# Altium footprint library WR-PHD_Socket Header.PcbLib: 279 footprints (part 6 of 18)
Each footprint in its own frame and in the unit in brackets; x right, y up, seen from the top. Pads: shape width x height; smd on the part's side, far side on the other; paste and mask are expansions set on the pad; w line width, h text height; cw(c..) or ccw(c..) is an arc to the next point about the centre after c.
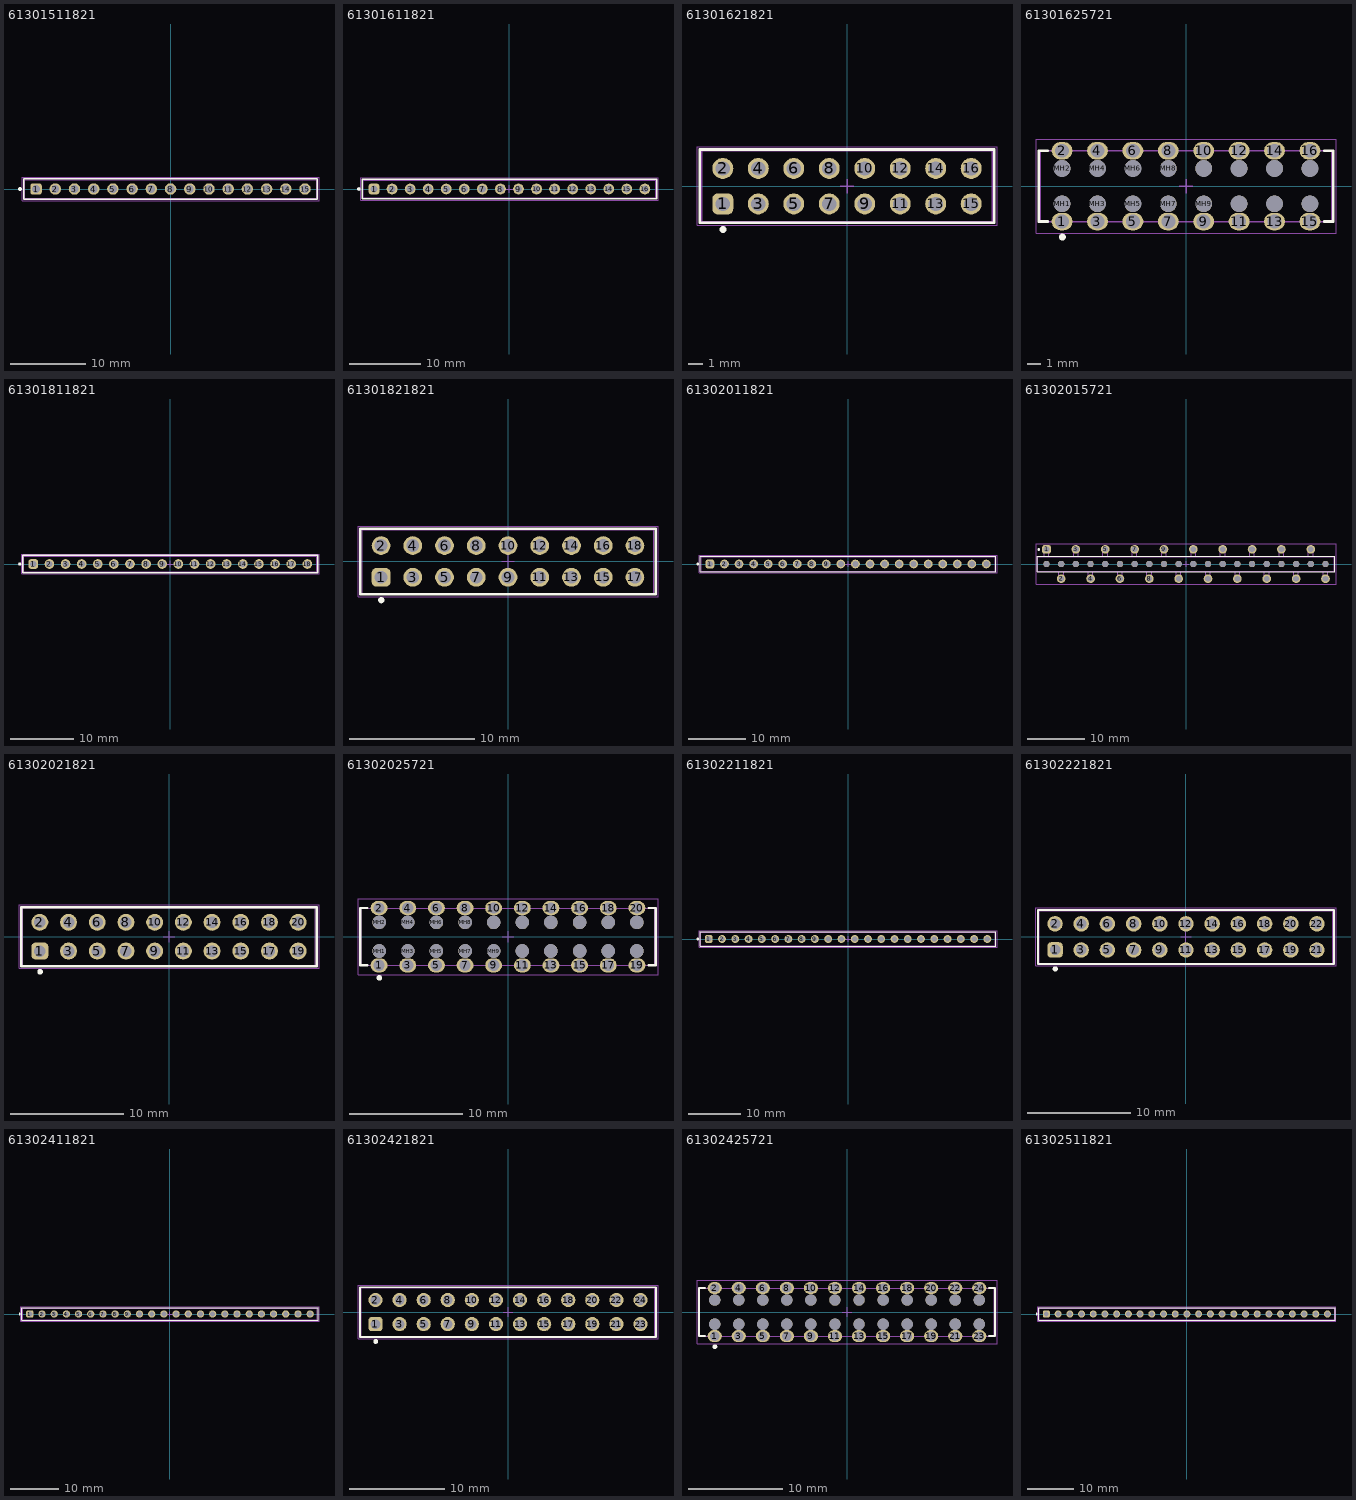
[diagram p5: the footprints below, top view; thin cyan lines are the x and y axes]

## 61301511821 [mm] "Socket Header, Pitch 2.54 mm, THT, Vertical, single row, 15p"
height 8.5
pads (15):
  rrect50% 1.52x1.52 hole 1.02: 1(-17.78,0)
  round 1.52 hole 1.02: 2(-15.24,0) 3(-12.7,0) 4(-10.16,0) 5(-7.62,0) 6(-5.08,0) 7(-2.54,0) 8(0,0) 9(2.54,0) 10(5.08,0) 11(7.62,0) 12(10.16,0) 13(12.7,0) 14(15.24,0) 15(17.78,0)
Top Overlay:
  circle w0.25: c-19.91,0 r0.125
  lines w0.2: -19.425,-1.35 19.425,-1.35 19.425,1.35 -19.425,1.35 -19.425,-1.35
Top Component Outline:
  lines w0.1: -19.3,-1.25 19.3,-1.25 19.3,1.25 -19.3,1.25 -19.3,-1.25
Top Designator:
  text ".Designator" at -3.647,-0.357 h1
Top Courtyard:
  lines w0.05: -19.625,-1.55 19.625,-1.55 19.625,1.55 -19.625,1.55 -19.625,-1.55
Top Component Center:
  lines w0.1: -0.5,0 0.5,0 ; 0,-0.5 0,0.5
3D body "61301511821.stp": height 8.55, standoff -3.06, extent -19.3,-1.25 19.3,1.25

## 61301611821 [mm] "Socket Header, Pitch 2.54 mm, THT, Vertical, single row, 16p"
height 8.5
pads (16):
  rrect50% 1.52x1.52 hole 1.02: 1(-19.05,0)
  round 1.52 hole 1.02: 2(-16.51,0) 3(-13.97,0) 4(-11.43,0) 5(-8.89,0) 6(-6.35,0) 7(-3.81,0) 8(-1.27,0) 9(1.27,0) 10(3.81,0) 11(6.35,0) 12(8.89,0) 13(11.43,0) 14(13.97,0) 15(16.51,0) 16(19.05,0)
Top Overlay:
  circle w0.25: c-21.18,0 r0.125
  lines w0.2: -20.695,-1.35 20.695,-1.35 20.695,1.35 -20.695,1.35 -20.695,-1.35
Top Component Outline:
  lines w0.1: -20.57,-1.25 20.57,-1.25 20.57,1.25 -20.57,1.25 -20.57,-1.25
Top Designator:
  text ".Designator" at -3.647,-0.357 h1
Top Courtyard:
  lines w0.05: -20.895,-1.55 20.895,-1.55 20.895,1.55 -20.895,1.55 -20.895,-1.55
Top Component Center:
  lines w0.1: -0.5,0 0.5,0 ; 0,-0.5 0,0.5
3D body "61301611821.stp": height 8.55, standoff -3.06, extent -20.57,-1.25 20.57,1.25

## 61301621821 [mm] "Socket Header, Pitch 2.54 mm, THT, Vertical, dual row, 16p"
height 8.4
pads (16):
  rrect50% 1.5x1.5 hole 1.02: 1(-8.89,-1.27)
  round 1.5 hole 1.02: 2(-8.89,1.27) 3(-6.35,-1.27) 4(-6.35,1.27) 5(-3.81,-1.27) 6(-3.81,1.27) 7(-1.27,-1.27) 8(-1.27,1.27) 9(1.27,-1.27) 10(1.27,1.27) 11(3.81,-1.27) 12(3.81,1.27) 13(6.35,-1.27) 14(6.35,1.27) 15(8.89,-1.27) 16(8.89,1.27)
Top Overlay:
  circle w0.25: c-8.87,-3.1 r0.125
  lines w0.2: -10.535,-2.615 -10.535,2.615 10.535,2.615 10.535,-2.615 -10.535,-2.615
Top Component Outline:
  lines w0.1: -10.41,-2.54 10.41,-2.54 10.41,2.54 -10.41,2.54 -10.41,-2.54
Top Designator:
  text ".Designator" at -3.647,-0.357 h1
Top Courtyard:
  lines w0.05: -10.735,-2.815 10.735,-2.815 10.735,2.815 -10.735,2.815 -10.735,-2.815
Top Component Center:
  lines w0.1: -0.5,0 0.5,0 ; 0,-0.5 0,0.5
3D body "61301621821.stp": height 8.45, standoff -3.05, extent -10.41,-2.54 10.41,2.54

## 61301625721 [mm] "Dual Socket Header Bottom Entry, pitch 2.54mm, 16p"
height 5
pads (32):
  oval 1.5x1.25 hole 1: 1(-8.89,-2.54) 2(-8.89,2.54) 3(-6.35,-2.54) 4(-6.35,2.54) 5(-3.81,-2.54) 6(-3.81,2.54) 7(-1.27,-2.54) 8(-1.27,2.54) 9(1.27,-2.54) 10(1.27,2.54) 11(3.81,-2.54) 12(3.81,2.54) 13(6.35,-2.54) 14(6.35,2.54) 15(8.89,-2.54) 16(8.89,2.54)
  round 1.2 hole 1.2 unplated: MH1(-8.89,-1.27) MH2(-8.89,1.27) MH3(-6.35,-1.27) MH4(-6.35,1.27) MH5(-3.81,-1.27) MH6(-3.81,1.27) MH7(-1.27,-1.27) MH8(-1.27,1.27) MH9(1.27,-1.27) MH10(1.27,1.27) MH11(3.81,-1.27) MH12(3.81,1.27) MH13(6.35,-1.27) MH14(6.35,1.27) MH15(8.89,-1.27) MH16(8.89,1.27)
Top Overlay:
  circle w0.25: c-8.87,-3.65 r0.125
  lines w0.2: -9.92,-2.54 -10.56,-2.54 -10.56,2.54 -9.92,2.54 ; 9.92,-2.54 10.56,-2.54 10.56,2.54 9.92,2.54
Top Component Outline:
  lines w0.1: -10.46,-2.54 -10.46,2.54 10.46,2.54 10.46,-2.54 -10.46,-2.54
Top Designator:
  text ".Designator" at -3.647,-0.357 h1
Top Courtyard:
  lines w0.05: -10.76,-3.365 10.76,-3.365 10.76,3.365 -10.76,3.365 -10.76,-3.365
Top Component Center:
  lines w0.1: -0.5,0 0.5,0 ; 0,-0.5 0,0.5
3D body "61301625721.stp": height 5.05, standoff -3.05, extent -10.46,-2.665 10.46,2.665

## 61301811821 [mm] "Socket Header, Pitch 2.54 mm, THT, Vertical, single row, 18p"
height 8.5
pads (18):
  rrect50% 1.52x1.52 hole 1.02: 1(-21.59,0)
  round 1.52 hole 1.02: 2(-19.05,0) 3(-16.51,0) 4(-13.97,0) 5(-11.43,0) 6(-8.89,0) 7(-6.35,0) 8(-3.81,0) 9(-1.27,0) 10(1.27,0) 11(3.81,0) 12(6.35,0) 13(8.89,0) 14(11.43,0) 15(13.97,0) 16(16.51,0) 17(19.05,0) 18(21.59,0)
Top Overlay:
  circle w0.25: c-23.72,0 r0.125
  lines w0.2: -23.235,-1.35 -23.235,1.35 23.235,1.35 23.235,-1.35 -23.235,-1.35
Top Component Outline:
  lines w0.1: -23.11,-1.25 -23.11,1.25 23.11,1.25 23.11,-1.25 -23.11,-1.25
Top Designator:
  text ".Designator" at -3.647,-0.357 h1
Top Courtyard:
  lines w0.05: -23.435,-1.55 -23.435,1.55 23.435,1.55 23.435,-1.55 -23.435,-1.55
Top Component Center:
  lines w0.1: -0.5,0 0.5,0 ; 0,-0.5 0,0.5
3D body "61301811821.stp": height 8.55, standoff -3.06, extent -23.11,-1.25 23.11,1.25

## 61301821821 [mm] "Socket Header, Pitch 2.54 mm, THT, Vertical, dual row, 18p"
height 8.4
pads (18):
  rrect50% 1.5x1.5 hole 1.02: 1(-10.16,-1.27)
  round 1.5 hole 1.02: 2(-10.16,1.27) 3(-7.62,-1.27) 4(-7.62,1.27) 5(-5.08,-1.27) 6(-5.08,1.27) 7(-2.54,-1.27) 8(-2.54,1.27) 9(0,-1.27) 10(0,1.27) 11(2.54,-1.27) 12(2.54,1.27) 13(5.08,-1.27) 14(5.08,1.27) 15(7.62,-1.27) 16(7.62,1.27) 17(10.16,-1.27) 18(10.16,1.27)
Top Overlay:
  circle w0.25: c-10.14,-3.1 r0.125
  lines w0.2: -11.805,-2.615 11.805,-2.615 11.805,2.615 -11.805,2.615 -11.805,-2.615
Top Component Outline:
  lines w0.1: -11.68,-2.54 -11.68,2.54 11.68,2.54 11.68,-2.54 -11.68,-2.54
Top Designator:
  text ".Designator" at -3.647,-0.357 h1
Top Courtyard:
  lines w0.05: -12.005,-2.815 -12.005,2.815 12.005,2.815 12.005,-2.815 -12.005,-2.815
Top Component Center:
  lines w0.1: -0.5,0 0.5,0 ; 0,-0.5 0,0.5
3D body "61301821821.stp": height 8.45, standoff -3.05, extent -11.68,-2.54 11.68,2.54

## 61302011821 [mm] "Socket Header, Pitch 2.54 mm, THT, Vertical, single row, 20p"
height 8.5
pads (20):
  rrect50% 1.52x1.52 hole 1.02: 1(-24.13,0)
  round 1.52 hole 1.02: 2(-21.59,0) 3(-19.05,0) 4(-16.51,0) 5(-13.97,0) 6(-11.43,0) 7(-8.89,0) 8(-6.35,0) 9(-3.81,0) 10(-1.27,0) 11(1.27,0) 12(3.81,0) 13(6.35,0) 14(8.89,0) 15(11.43,0) 16(13.97,0) 17(16.51,0) 18(19.05,0) 19(21.59,0) 20(24.13,0)
Top Overlay:
  circle w0.25: c-26.26,0 r0.125
  lines w0.2: -25.775,-1.35 25.775,-1.35 25.775,1.35 -25.775,1.35 -25.775,-1.35
Top Component Outline:
  lines w0.1: -25.65,-1.25 25.65,-1.25 25.65,1.25 -25.65,1.25 -25.65,-1.25
Top Designator:
  text ".Designator" at -3.647,-0.357 h1
Top Courtyard:
  lines w0.05: -25.975,-1.55 25.975,-1.55 25.975,1.55 -25.975,1.55 -25.975,-1.55
Top Component Center:
  lines w0.1: -0.5,0 0.5,0 ; 0,-0.5 0,0.5
3D body "61302011821.stp": height 8.55, standoff -3.06, extent -25.65,-1.25 25.65,1.25

## 61302015721 [mm] "Socket Header, Pitch 2.54 mm, THT, Vertical, single row, 20p"
height 5
pads (40):
  rrect50% 1.5x1.5 hole 1: 1(-24.13,2.54)
  round 1.5 hole 1: 2(-21.59,-2.54) 3(-19.05,2.54) 4(-16.51,-2.54) 5(-13.97,2.54) 6(-11.43,-2.54) 7(-8.89,2.54) 8(-6.35,-2.54) 9(-3.81,2.54) 10(-1.27,-2.54) 11(1.27,2.54) 12(3.81,-2.54) 13(6.35,2.54) 14(8.89,-2.54) 15(11.43,2.54) 16(13.97,-2.54) 17(16.51,2.54) 18(19.05,-2.54) 19(21.59,2.54) 20(24.13,-2.54)
  round 1.1 hole 1.1 unplated: MH1(-24.13,0) MH2(-21.59,0) MH3(-19.05,0) MH4(-16.51,0) MH5(-13.97,0) MH6(-11.43,0) MH7(-8.89,0) MH8(-6.35,0) MH9(-3.81,0) MH10(-1.27,0) MH11(1.27,0) MH12(3.81,0) MH13(6.35,0) MH14(8.89,0) MH15(11.43,0) MH16(13.97,0) MH17(16.51,0) MH18(19.05,0) MH19(21.59,0) MH20(24.13,0)
Top Overlay:
  circle w0.25: c-25.47,2.5 r0.125
  lines w0.2: -25.75,-1.345 25.75,-1.345 25.75,1.345 -25.75,1.345 -25.75,-1.345
Top Component Outline:
  lines w0.1: -24.53,1.27 -24.53,2.665 -23.73,2.665 -23.73,1.27 ; -21.99,-1.27 -21.99,-2.665 -21.19,-2.665 -21.19,-1.27 ; -19.45,1.27 -19.45,2.665 -18.65,2.665 -18.65,1.27 ; -16.91,-1.27 -16.91,-2.665 -16.11,-2.665 -16.11,-1.27 ; -14.37,1.27 -14.37,2.665 -13.57,2.665 -13.57,1.27 ; -11.83,-1.27 -11.83,-2.665 -11.03,-2.665 -11.03,-1.27 ; -9.29,1.27 -9.29,2.665 -8.49,2.665 -8.49,1.27 ; -6.75,-1.27 -6.75,-2.665 -5.95,-2.665 -5.95,-1.27 ; -4.21,1.27 -4.21,2.665 -3.41,2.665 -3.41,1.27 ; -1.67,-1.27 -1.67,-2.665 -0.87,-2.665 -0.87,-1.27 ; 0.87,1.27 0.87,2.665 1.67,2.665 1.67,1.27 ; 3.41,-1.27 3.41,-2.665 4.21,-2.665 4.21,-1.27 ; 5.95,1.27 5.95,2.665 6.75,2.665 6.75,1.27 ; 8.49,-1.27 8.49,-2.665 9.29,-2.665 9.29,-1.27 ; 11.03,1.27 11.03,2.665 11.83,2.665 11.83,1.27 ; 13.57,-1.27 13.57,-2.665 14.37,-2.665 14.37,-1.27 ; 16.11,1.27 16.11,2.665 16.91,2.665 16.91,1.27 ; 18.65,-1.27 18.65,-2.665 19.45,-2.665 19.45,-1.27 ; 21.19,1.27 21.19,2.665 21.99,2.665 21.99,1.27 ; 23.73,-1.27 23.73,-2.665 24.53,-2.665 24.53,-1.27 ; -25.65,-1.27 25.65,-1.27 25.65,1.27 -25.65,1.27 -25.65,-1.27
Top Designator:
  text ".Designator" at -3.647,-0.357 h1
Top Courtyard:
  lines w0.05: -25.95,-3.49 -25.95,3.49 25.95,3.49 25.95,-3.49 -25.95,-3.49
Top Component Center:
  lines w0.1: -0.5,0 0.5,0 ; 0,-0.5 0,0.5
3D body "61302015721.stp": height 5.17, standoff -2.93, extent -25.7,-2.665 25.7,2.665

## 61302021821 [mm] "Socket Header, Pitch 2.54 mm, THT, Vertical, dual row, 20p"
height 8.4
pads (20):
  rrect50% 1.5x1.5 hole 1.02: 1(-11.43,-1.27)
  round 1.5 hole 1.02: 2(-11.43,1.27) 3(-8.89,-1.27) 4(-8.89,1.27) 5(-6.35,-1.27) 6(-6.35,1.27) 7(-3.81,-1.27) 8(-3.81,1.27) 9(-1.27,-1.27) 10(-1.27,1.27) 11(1.27,-1.27) 12(1.27,1.27) 13(3.81,-1.27) 14(3.81,1.27) 15(6.35,-1.27) 16(6.35,1.27) 17(8.89,-1.27) 18(8.89,1.27) 19(11.43,-1.27) 20(11.43,1.27)
Top Overlay:
  circle w0.25: c-11.41,-3.1 r0.125
  lines w0.2: -13.075,-2.615 -13.075,2.615 13.075,2.615 13.075,-2.615 -13.075,-2.615
Top Component Outline:
  lines w0.1: -12.95,-2.54 12.95,-2.54 12.95,2.54 -12.95,2.54 -12.95,-2.54
Top Designator:
  text ".Designator" at -3.647,-0.357 h1
Top Courtyard:
  lines w0.05: -13.275,-2.815 13.275,-2.815 13.275,2.815 -13.275,2.815 -13.275,-2.815
Top Component Center:
  lines w0.1: -0.5,0 0.5,0 ; 0,-0.5 0,0.5
3D body "61302021821.stp": height 8.45, standoff -3.05, extent -12.95,-2.54 12.95,2.54

## 61302025721 [mm] "Dual Socket Header Bottom Entry, pitch 2.54mm, 20p"
height 5
pads (40):
  oval 1.5x1.25 hole 1: 1(-11.43,-2.54) 2(-11.43,2.54) 3(-8.89,-2.54) 4(-8.89,2.54) 5(-6.35,-2.54) 6(-6.35,2.54) 7(-3.81,-2.54) 8(-3.81,2.54) 9(-1.27,-2.54) 10(-1.27,2.54) 11(1.27,-2.54) 12(1.27,2.54) 13(3.81,-2.54) 14(3.81,2.54) 15(6.35,-2.54) 16(6.35,2.54) 17(8.89,-2.54) 18(8.89,2.54) 19(11.43,-2.54) 20(11.43,2.54)
  round 1.2 hole 1.2 unplated: MH1(-11.43,-1.27) MH2(-11.43,1.27) MH3(-8.89,-1.27) MH4(-8.89,1.27) MH5(-6.35,-1.27) MH6(-6.35,1.27) MH7(-3.81,-1.27) MH8(-3.81,1.27) MH9(-1.27,-1.27) MH10(-1.27,1.27) MH11(1.27,-1.27) MH12(1.27,1.27) MH13(3.81,-1.27) MH14(3.81,1.27) MH15(6.35,-1.27) MH16(6.35,1.27) MH17(8.89,-1.27) MH18(8.89,1.27) MH19(11.43,-1.27) MH20(11.43,1.27)
Top Overlay:
  circle w0.25: c-11.41,-3.65 r0.125
  lines w0.2: -12.46,-2.54 -13.1,-2.54 -13.1,2.54 -12.46,2.54 ; 12.46,-2.54 13.1,-2.54 13.1,2.54 12.46,2.54
Top Component Outline:
  lines w0.1: -13,-2.54 -13,2.54 13,2.54 13,-2.54 -13,-2.54
Top Designator:
  text ".Designator" at -3.647,-0.357 h1
Top Courtyard:
  lines w0.05: -13.3,-3.365 13.3,-3.365 13.3,3.365 -13.3,3.365 -13.3,-3.365
Top Component Center:
  lines w0.1: -0.5,0 0.5,0 ; 0,-0.5 0,0.5
3D body "61302025721.stp": height 5.05, standoff -3.05, extent -13,-2.665 13,2.665

## 61302211821 [mm] "Socket Header, Pitch 2.54 mm, THT, Vertical, single row, 22p"
height 8.5
pads (22):
  rrect50% 1.52x1.52 hole 1.02: 1(-26.67,0)
  round 1.52 hole 1.02: 2(-24.13,0) 3(-21.59,0) 4(-19.05,0) 5(-16.51,0) 6(-13.97,0) 7(-11.43,0) 8(-8.89,0) 9(-6.35,0) 10(-3.81,0) 11(-1.27,0) 12(1.27,0) 13(3.81,0) 14(6.35,0) 15(8.89,0) 16(11.43,0) 17(13.97,0) 18(16.51,0) 19(19.05,0) 20(21.59,0) 21(24.13,0) 22(26.67,0)
Top Overlay:
  circle w0.25: c-28.8,0 r0.125
  lines w0.2: -28.315,-1.35 28.315,-1.35 28.315,1.35 -28.315,1.35 -28.315,-1.35
Top Component Outline:
  lines w0.1: -28.19,-1.25 28.19,-1.25 28.19,1.25 -28.19,1.25 -28.19,-1.25
Top Designator:
  text ".Designator" at -3.647,-0.357 h1
Top Courtyard:
  lines w0.05: -28.515,-1.55 28.515,-1.55 28.515,1.55 -28.515,1.55 -28.515,-1.55
Top Component Center:
  lines w0.1: -0.5,0 0.5,0 ; 0,-0.5 0,0.5
3D body "61302211821.stp": height 8.55, standoff -3.06, extent -28.19,-1.25 28.19,1.25

## 61302221821 [mm] "Socket Header, Pitch 2.54 mm, THT, Vertical, dual row, 22p"
height 8.4
pads (22):
  rrect50% 1.5x1.5 hole 1.02: 1(-12.7,-1.27)
  round 1.5 hole 1.02: 2(-12.7,1.27) 3(-10.16,-1.27) 4(-10.16,1.27) 5(-7.62,-1.27) 6(-7.62,1.27) 7(-5.08,-1.27) 8(-5.08,1.27) 9(-2.54,-1.27) 10(-2.54,1.27) 11(0,-1.27) 12(0,1.27) 13(2.54,-1.27) 14(2.54,1.27) 15(5.08,-1.27) 16(5.08,1.27) 17(7.62,-1.27) 18(7.62,1.27) 19(10.16,-1.27) 20(10.16,1.27) 21(12.7,-1.27) 22(12.7,1.27)
Top Overlay:
  circle w0.25: c-12.68,-3.1 r0.125
  lines w0.2: -14.345,-2.615 14.345,-2.615 14.345,2.615 -14.345,2.615 -14.345,-2.615
Top Component Outline:
  lines w0.1: -14.22,-2.54 -14.22,2.54 14.22,2.54 14.22,-2.54 -14.22,-2.54
Top Designator:
  text ".Designator" at -3.647,-0.357 h1
Top Courtyard:
  lines w0.05: -14.545,-2.815 -14.545,2.815 14.545,2.815 14.545,-2.815 -14.545,-2.815
Top Component Center:
  lines w0.1: -0.5,0 0.5,0 ; 0,-0.5 0,0.5
3D body "61302221821.stp": height 8.45, standoff -3.05, extent -14.22,-2.54 14.22,2.54

## 61302411821 [mm] "Socket Header, Pitch 2.54 mm, THT, Vertical, single row, 24p"
height 8.5
pads (24):
  rrect50% 1.52x1.52 hole 1.02: 1(-29.21,0)
  round 1.52 hole 1.02: 2(-26.67,0) 3(-24.13,0) 4(-21.59,0) 5(-19.05,0) 6(-16.51,0) 7(-13.97,0) 8(-11.43,0) 9(-8.89,0) 10(-6.35,0) 11(-3.81,0) 12(-1.27,0) 13(1.27,0) 14(3.81,0) 15(6.35,0) 16(8.89,0) 17(11.43,0) 18(13.97,0) 19(16.51,0) 20(19.05,0) 21(21.59,0) 22(24.13,0) 23(26.67,0) 24(29.21,0)
Top Overlay:
  circle w0.25: c-31.34,0 r0.125
  lines w0.2: -30.855,-1.35 -30.855,1.35 30.855,1.35 30.855,-1.35 -30.855,-1.35
Top Component Outline:
  lines w0.1: -30.73,-1.25 -30.73,1.25 30.73,1.25 30.73,-1.25 -30.73,-1.25
Top Designator:
  text ".Designator" at -3.647,-0.357 h1
Top Courtyard:
  lines w0.05: -31.055,-1.55 -31.055,1.55 31.055,1.55 31.055,-1.55 -31.055,-1.55
Top Component Center:
  lines w0.1: -0.5,0 0.5,0 ; 0,-0.5 0,0.5
3D body "61302411821.stp": height 8.55, standoff -3.06, extent -30.73,-1.25 30.73,1.25

## 61302421821 [mm] "Socket Header, Pitch 2.54 mm, THT, Vertical, dual row, 24p"
height 8.4
pads (24):
  rrect50% 1.5x1.5 hole 1.02: 1(-13.97,-1.27)
  round 1.5 hole 1.02: 2(-13.97,1.27) 3(-11.43,-1.27) 4(-11.43,1.27) 5(-8.89,-1.27) 6(-8.89,1.27) 7(-6.35,-1.27) 8(-6.35,1.27) 9(-3.81,-1.27) 10(-3.81,1.27) 11(-1.27,-1.27) 12(-1.27,1.27) 13(1.27,-1.27) 14(1.27,1.27) 15(3.81,-1.27) 16(3.81,1.27) 17(6.35,-1.27) 18(6.35,1.27) 19(8.89,-1.27) 20(8.89,1.27) 21(11.43,-1.27) 22(11.43,1.27) 23(13.97,-1.27) 24(13.97,1.27)
Top Overlay:
  circle w0.25: c-13.95,-3.1 r0.125
  lines w0.2: -15.615,-2.615 -15.615,2.615 15.615,2.615 15.615,-2.615 -15.615,-2.615
Top Component Outline:
  lines w0.1: -15.49,-2.54 15.49,-2.54 15.49,2.54 -15.49,2.54 -15.49,-2.54
Top Designator:
  text ".Designator" at -3.647,-0.357 h1
Top Courtyard:
  lines w0.05: -15.815,-2.815 15.815,-2.815 15.815,2.815 -15.815,2.815 -15.815,-2.815
Top Component Center:
  lines w0.1: -0.5,0 0.5,0 ; 0,-0.5 0,0.5
3D body "61302421821.stp": height 8.45, standoff -3.05, extent -15.49,-2.54 15.49,2.54

## 61302425721 [mm] "Dual Socket Header Bottom Entry, pitch 2.54mm, 24p"
height 5
pads (48):
  oval 1.5x1.25 hole 1: 1(-13.97,-2.54) 2(-13.97,2.54) 3(-11.43,-2.54) 4(-11.43,2.54) 5(-8.89,-2.54) 6(-8.89,2.54) 7(-6.35,-2.54) 8(-6.35,2.54) 9(-3.81,-2.54) 10(-3.81,2.54) 11(-1.27,-2.54) 12(-1.27,2.54) 13(1.27,-2.54) 14(1.27,2.54) 15(3.81,-2.54) 16(3.81,2.54) 17(6.35,-2.54) 18(6.35,2.54) 19(8.89,-2.54) 20(8.89,2.54) 21(11.43,-2.54) 22(11.43,2.54) 23(13.97,-2.54) 24(13.97,2.54)
  round 1.2 hole 1.2 unplated: MH1(-13.97,-1.27) MH2(-13.97,1.27) MH3(-11.43,-1.27) MH4(-11.43,1.27) MH5(-8.89,-1.27) MH6(-8.89,1.27) MH7(-6.35,-1.27) MH8(-6.35,1.27) MH9(-3.81,-1.27) MH10(-3.81,1.27) MH11(-1.27,-1.27) MH12(-1.27,1.27) MH13(1.27,-1.27) MH14(1.27,1.27) MH15(3.81,-1.27) MH16(3.81,1.27) MH17(6.35,-1.27) MH18(6.35,1.27) MH19(8.89,-1.27) MH20(8.89,1.27) MH21(11.43,-1.27) MH22(11.43,1.27) MH23(13.97,-1.27) MH24(13.97,1.27)
Top Overlay:
  circle w0.25: c-13.95,-3.65 r0.125
  lines w0.2: -15,-2.54 -15.64,-2.54 -15.64,2.54 -15,2.54 ; 15,-2.54 15.64,-2.54 15.64,2.54 15,2.54
Top Component Outline:
  lines w0.1: -15.54,-2.54 15.54,-2.54 15.54,2.54 -15.54,2.54 -15.54,-2.54
Top Designator:
  text ".Designator" at -3.647,-0.357 h1
Top Courtyard:
  lines w0.05: -15.84,-3.365 -15.84,3.365 15.84,3.365 15.84,-3.365 -15.84,-3.365
Top Component Center:
  lines w0.1: -0.5,0 0.5,0 ; 0,-0.5 0,0.5
3D body "61302425721.stp": height 5.05, standoff -3.05, extent -15.54,-2.665 15.54,2.665

## 61302511821 [mm] "Socket Header, Pitch 2.54 mm, THT, Vertical, single row, 25p"
height 8.5
pads (25):
  rrect50% 1.52x1.52 hole 1.02: 1(-30.48,0)
  round 1.52 hole 1.02: 2(-27.94,0) 3(-25.4,0) 4(-22.86,0) 5(-20.32,0) 6(-17.78,0) 7(-15.24,0) 8(-12.7,0) 9(-10.16,0) 10(-7.62,0) 11(-5.08,0) 12(-2.54,0) 13(0,0) 14(2.54,0) 15(5.08,0) 16(7.62,0) 17(10.16,0) 18(12.7,0) 19(15.24,0) 20(17.78,0) 21(20.32,0) 22(22.86,0) 23(25.4,0) 24(27.94,0) 25(30.48,0)
Top Overlay:
  circle w0.25: c-32.61,0 r0.125
  lines w0.2: -32.125,-1.35 -32.125,1.35 32.125,1.35 32.125,-1.35 -32.125,-1.35
Top Component Outline:
  lines w0.1: -32,-1.25 -32,1.25 32,1.25 32,-1.25 -32,-1.25
Top Designator:
  text ".Designator" at -3.647,-0.357 h1
Top Courtyard:
  lines w0.05: -32.325,-1.55 -32.325,1.55 32.325,1.55 32.325,-1.55 -32.325,-1.55
Top Component Center:
  lines w0.1: -0.5,0 0.5,0 ; 0,-0.5 0,0.5
3D body "61302511821 (rev1).stp": height 8.55, standoff -3.05, extent -32,-1.25 32,1.25